# Altium schematic symbol library 网口RJ45 Bel SI-46001-F.SCHLIB: 1 symbol
Pins are listed as number, name and electrical type; pins without a type are passive.

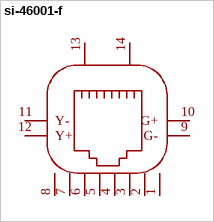
[diagram p0: symbol si-46001-f]

## si-46001-f
designator RJ??  (value not drawn)
连接器类型:RJ45插座;安装方式:弯插;端口数量:2;LED:带LED;屏蔽:有屏蔽;触头镀层:金;工作温度:0℃~+70℃;; Manufacturer: belfuse; AddInBom: yes; ModelId: 7e7265f4ce6d4878958776467abf3fc9; ModelName: RJ45-TH_BELFUSE_SI-46001-F; ModelTransform: 639.999,670.39236,0,0,0,0,0,-25.079,-157.48; Connector Type: RJ45插座; Number of Ports: 2; LED: 带LED; Shielding: 有屏蔽; PoE: 不带PoE; Symbol: SI-46001-F; LCSC Part Name: 弯插 带LED; SupplierPart: C19267755; ManufacturerPart: SI-46001-F; Supplier Footprint: RJ45-TH; JLCPCB Part Class: Extended Part; Datasheet: https://item.szlcsc.com/datasheet/SI-46001-F/20524665.html; Supplier: LCSC; ConvertToPcb: yes; FootprintName: RJ45-TH_BELFUSE_SI-46001-F; Mounting Type: 弯插; Contact Plating: 金; Operating Temperature: 0℃~+70℃
footprint RJ45-TH_BELFUSE_SI-46001-F
pins: 1, 2, 3, 4, 5, 6, 7, 8, 9 G-, 10 G+, 11 Y-, 12 Y+, 13 SHELL, 14 SHELL